# Altium schematic symbol library Connector.SchLib: 208 symbols (part 2 of 4)
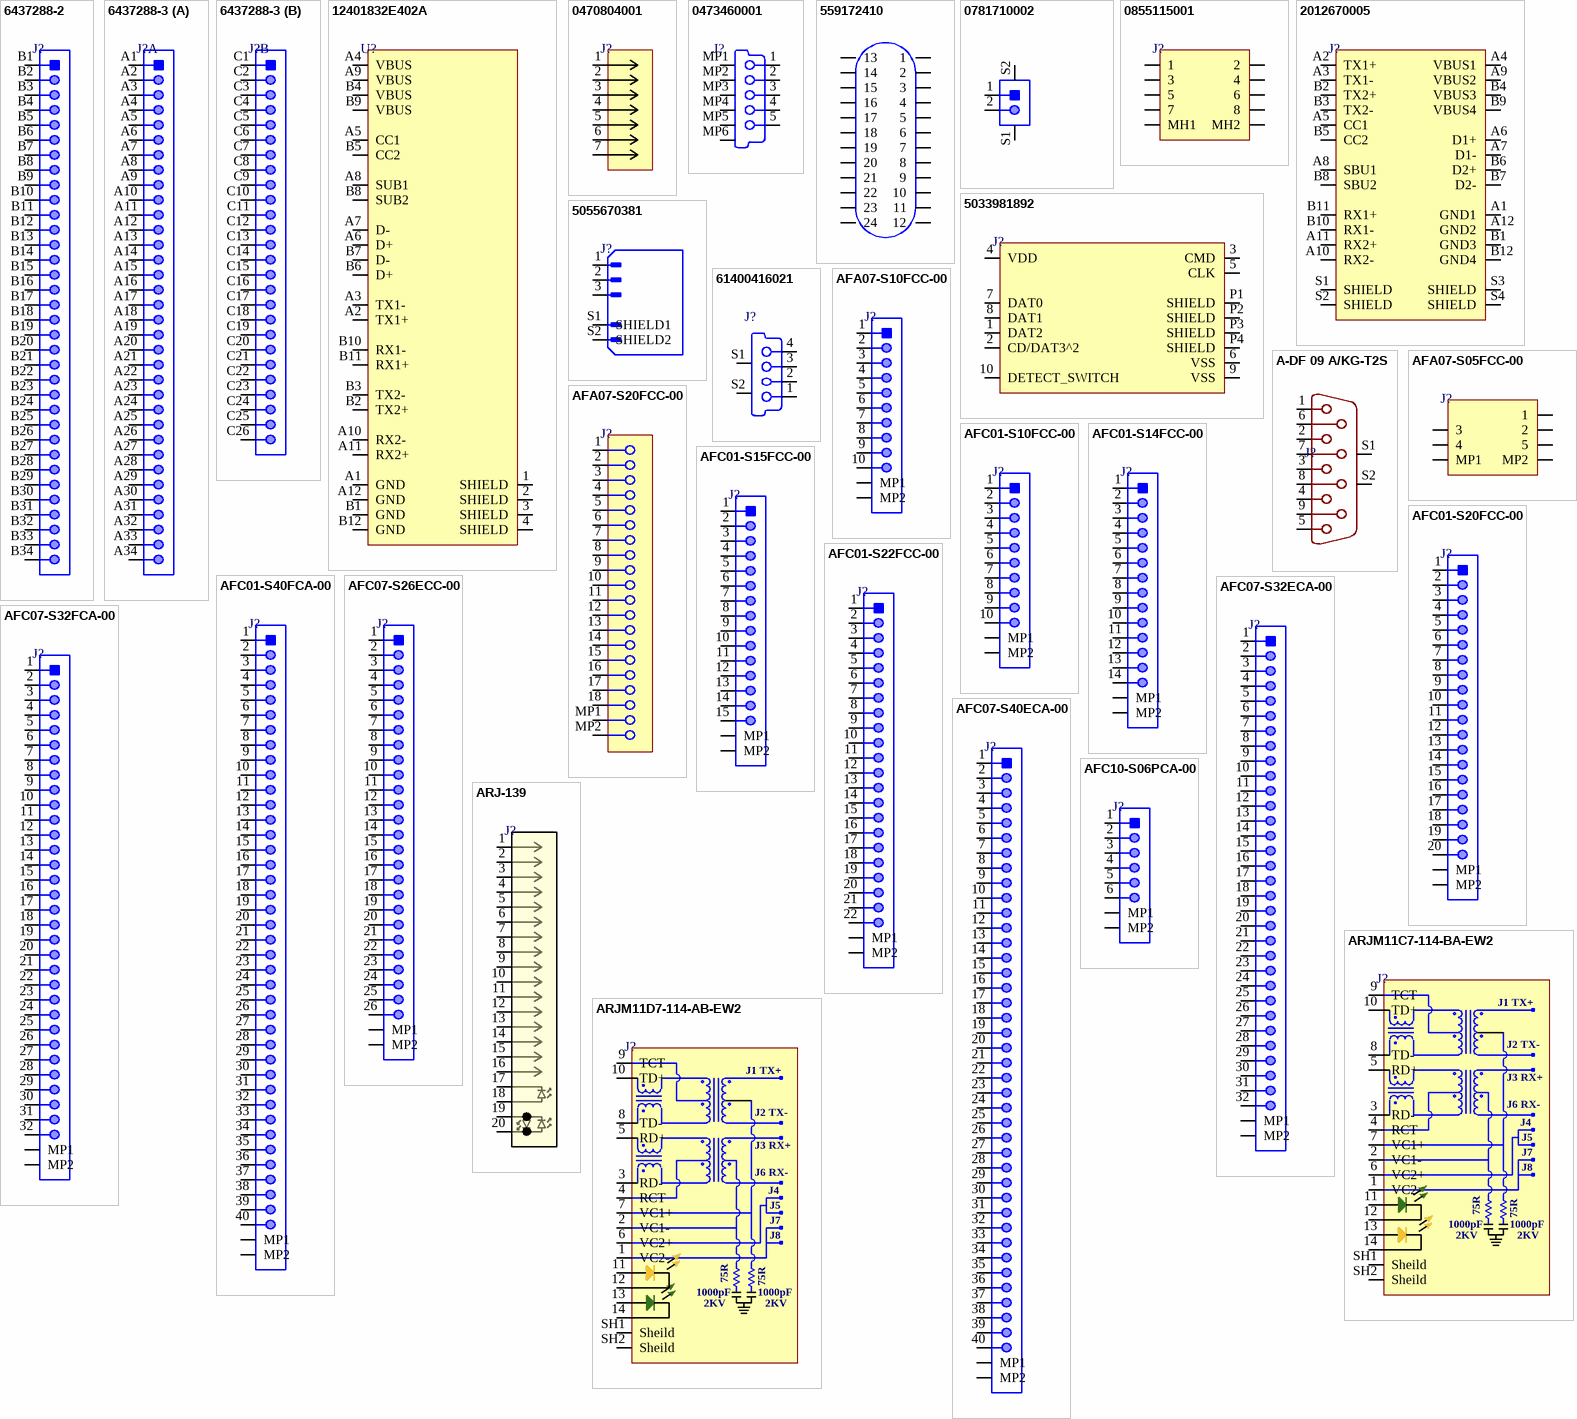
[diagram p9: symbols 6437288-2 to ARJM11D7-114-AB-EW2]

## 2012670005
designator J?
CONN RCP USB3.1 TYPEC 24P SMD RA; Manufacturer: Molex; Manufacturer Part Number: 2012670005; Item Type: USB C Connector; Supplier 1: RSComponents; RoHS: Yes; Category: Uncategorized; Stock 1: 1525; Pricing 1: 50=2.06600, 125=1.93000, 250=1.81600, 500=1.70800 (GBP); ComponentLink1URL: https://www.molex.com/pdm_docs/sd/2012670005_sd.pdf?src-supplier=Digi-Key; ComponentLink1Description: https://www.molex.com/pdm_docs/sd/2012670005_sd.pdf?src-supplier=Digi-Key; Supplier Part Number 1: 1768676P; ComponentLink2Description: LCSC; ComponentLink2URL: https://www.lcsc.com/product-detail/USB-Connectors_MOLEX-2012670005_C565324.html; LCSC Part Number: C565324
footprint 2012670005
pins: A1 GND1 (power), A2 TX1+, A3 TX1-, A4 VBUS1 (power), A5 CC1, A6 D1+, A7 D1-, A8 SBU1, A9 VBUS2 (power), A10 RX2-, A11 RX2+, A12 GND2 (power), B1 GND3 (power), B2 TX2+, B3 TX2-, B4 VBUS3 (power), B5 CC2, B6 D2+, B7 D2-, B8 SBU2, B9 VBUS4 (power), B10 RX1-, B11 RX1+, B12 GND4 (power), S1 SHIELD (power), S2 SHIELD (power), S3 SHIELD (power), S4 SHIELD (power)

## 5033981892
designator J?
MICRO SD PUSH/PUSH SMALL 8C; Manufacturer: Molex; Manufacturer Part Number: 503398-1892; Item Type: SD Card Connector; Supplier 1: Arrow Electronics; RoHS: Yes; Category: Memory Connectors; Stock 1: 14535; Pricing 1: 1=2.47900, 10=2.18900, 25=2.17400, 100=1.81200 (USD); ComponentLink1URL: https://datasheet.ciiva.com/29723/5033981892-sd-29723401.pdf?src-supplier=Digi-Key; ComponentLink1Description: https://datasheet.ciiva.com/29723/5033981892-sd-29723401.pdf?src-supplier=Digi-Key; ComponentLink2URL: https://datasheet.ciiva.com/22744/1740946-22744573.pdf?src-supplier=Element14; ComponentLink2Description: https://datasheet.ciiva.com/22744/1740946-22744573.pdf?src-supplier=Element14; ComponentLink3URL: https://datasheet.ciiva.com/23941/1740947-23941665.pdf?src-supplier=Newark; ComponentLink3Description: https://datasheet.ciiva.com/23941/1740947-23941665.pdf?src-supplier=Newark; Supplier Part Number 1: 503398-1892; LCSC Part Number: C428492
footprint 5033981892_
pins: 1 DAT2, 2 CD/DAT3^2, 3 CMD, 4 VDD, 5 CLK, 6 VSS, 7 DAT0, 8 DAT1, 9 VSS, 10 DETECT_SWITCH, P1 SHIELD, P2 SHIELD, P3 SHIELD, P4 SHIELD

## 5055670381
designator J?
CONN HEADER SMD R/A 3POS 1.25MM; Manufacturer: Molex; Manufacturer Part Number: 5055670381; Item Type: Headers and Wire Housings; Supplier: Mouser; Supplier Part Number: 538-505567-0381; RoHS: Yes; Stock: 6126; Pricing: 1=0.94, 10=0.784, 50=0.784, 100=0.653, 1000=0.65, 10000=0.501 (USD); ComponentLink1URL: http://www.literature.molex.com/SQLImages/kelmscott/Molex/PDF_Images/987651-4888.PDF?src-supplier=Digikey; ComponentLink1Description: http://www.literature.molex.com/SQLImages/kelmscott/Molex/PDF_Images/987651-4888.PDF?src-supplier=Digikey
footprint 5055670381
pins: 1, 2, 3, S1 SHIELD1, S2 SHIELD2

## 61400416021
designator J?
CONN RCPT USB2.0 TYPEA 4POS R/A; Manufacturer: Wurth Electronics; Manufacturer Part Number: 61400416021; Gender: Receptacle; Connector Type: USB; Number of Contacts: 4; Current Rating: 1A; Voltage Rating: 30V; Number of Ports: 1; Insulation Resistance: 1GR; Item Type: Connector; Supplier 1: Digi-Key; Stock 1: 7748; Pricing 1: 1=0.99, 10=0.874, 50=0.823, 100=0.739, 250=0.672 (USD); Mount: Through Hole,Horizontal; Contact Plating: Gold; Contact Material: Copper Alloy; Color: White; Min Operating Temperature: -40°C; Max Operating Temperature: 105°C; Packaging: Tray; Package Quantity: 60; Series: WR-COM; Number of Positions: 4; Termination: Solder; Orientation: Right Angle; USB Standard: USB 2.0; Length: 15.8mm; Width: 14.4mm; REACH SVHC: Unknown; Lead Free: Lead Free; Flammability Rating: UL94 V-0; ComponentLink1URL: https://www.distrelec.biz/Web/Downloads/he/et/4257096_eng_datasheet.pdf?mime=application%2Fpdf&src-supplier=Distrelec; ComponentLink1Description: https://www.distrelec.biz/Web/Downloads/he/et/4257096_eng_datasheet.pdf?mime=application%2Fpdf&src-supplier=Distrelec; ComponentLink2URL: http://www.farnell.com/datasheets/1712150.pdf?src-supplier=Element14; ComponentLink2Description: http://www.farnell.com/datasheets/1712150.pdf?src-supplier=Element14; ComponentLink3URL: http://www.farnell.com/datasheets/1712150.pdf?src-supplier=Newark; ComponentLink3Description: http://www.farnell.com/datasheets/1712150.pdf?src-supplier=Newark; ComponentLink4URL: http://katalog.we-online.de/kataloge/eican/media/pdf/61400416021.pdf?src-supplier=Mouser; ComponentLink4Description: http://katalog.we-online.de/kataloge/eican/media/pdf/61400416021.pdf?src-supplier=Mouser; ComponentLink5URL: https://katalog.we-online.de/em/datasheet/61400416021.pdf?src-supplier=Digi-Key; ComponentLink5Description: https://katalog.we-online.de/em/datasheet/61400416021.pdf?src-supplier=Digi-Key; ComponentLink6URL: http://documents.rs-components.com/techlib://itc_doclist_GB.htm?stockno=7480863&src-supplier=RSComponents; ComponentLink6Description: http://documents.rs-components.com/techlib://itc_doclist_GB.htm?stockno=7480863&src-supplier=RSComponents; ComponentLink7URL: http://www.produktinfo.conrad.com/datenblaetter/1000000-1099999/001088207-da-01-en-WR_COM_USB_TYP_A__61400416021.pdf?src-supplier=Conrad; ComponentLink7Description: http://www.produktinfo.conrad.com/datenblaetter/1000000-1099999/001088207-da-01-en-WR_COM_USB_TYP_A__61400416021.pdf?src-supplier=Conrad; Supplier Part Number 1: 732-2106-ND
footprint 61400416021_
pins: 1 V BUS (5V) "USB Vcc [Red]", 2 D- "USB Data - [White]", 3 D+ "USB Data + [Green]", 4 NC "Not Connected (or joined to pin 5 via resistor)", S1 Shield "Shell", S2 Shield "Shell"

## A-DF 09 A/KG-T2S
designator J?
CONN D-SUB RCPT 9POS R/A SLDR; Manufacturer: Assmann; Manufacturer Part Number: A-DF 09 A/KG-T2S; Item Type: D-Sub Connectors; Number of Contacts: 9NUMBER; Supplier: Digikey; Supplier Part Number: AE10921-ND; RoHS: Yes; Stock: 23990; Pricing: 1=0.78, 10=0.661, 25=0.6336, 40=0.62025, 90=0.59322, 270=0.53933, 450=0.4854, 990=0.43147, 2430=0.39102 (USD); Height: 12.68mm; Lead Free: 5697LeadFree; ComponentLink1URL: https://datasheet.ciiva.com/26927/getdatasheetpartid-755627-26927441.pdf?src-supplier=Verical; ComponentLink1Description: https://datasheet.ciiva.com/26927/getdatasheetpartid-755627-26927441.pdf?src-supplier=Verical
footprint A-DF 09 A/KG-T2S
pins: 1, 2, 3, 4, 5, 6, 7, 8, 9, S1, S2

## AFA07-S05FCC-00
designator J?
Slide Lock 5P Bottom Contact Surface Mount，Right Angle 1mm SMD,P=1mm,Surface Mount，Right Angle FFC/FPC Connectors ROHS; Manufacturer: JUSHUO; Manufacturer Part Number: AFA07-S05FCC-00; Package: SMD,P=1mm; LCSC Part Number: C262339; Item Type: FPC Connector; ComponentLink1Description: LCSC; ComponentLink1URL: https://www.lcsc.com/product-detail/FFC-FPC-Connectors_JUSHUO-AFA07-S05FCC-00_C262339.html
footprint AFA07-S05FCC-00
pins: 1, 2, 3, 4, 5, MP1, MP2

## AFA07-S10FCC-00
designator J?
Slide Lock 10P Bottom Contact Surface Mount 1mm SMD,P=1mm FFC/FPC Connectors ROHS; Manufacturer: JUSHUO; Manufacturer Part Number: AFA07-S10FCC-00; Package: SMD,P=1mm; LCSC Part Number: C52162; Item Type: FFC/FPC Connector; ComponentLink1Description: LCSC; ComponentLink1URL: https://www.lcsc.com/product-detail/FFC-FPC-Connectors_JUSHUO-AFA07-S10FCC-00_C52162.html
footprint AFA07-S10FCC-00
pins: 1, 2, 3, 4, 5, 6, 7, 8, 9, 10, MP1, MP2

## AFA07-S20FCC-00
designator J?
Slide Lock 20P Bottom Contact Surface Mount 1mm SMD,P=1mm,Surface Mount，Right Angle FFC/FPC Connectors ROHS; Manufacturer: JUSHUO; Manufacturer Part Number: AFA07-S20FCC-00; Package: SMD,P=1mm; LCSC Part Number: C262352; Item Type: FPC Connector; ComponentLink1Description: LCSC; ComponentLink1URL: https://www.lcsc.com/product-detail/FFC-FPC-Connectors_JUSHUO-AFA07-S20FCC-00_C262352.html
footprint AFA07-S20FCC-00
pins: 1, 2, 3, 4, 5, 6, 7, 8, 9, 10, 11, 12, 13, 14, 15, 16, 17, 18, MP1, MP2

## AFC01-S10FCC-00
designator J?
Clamshell 10 Bottom Contact Surface Mount 0.5mm SMD,P=0.5mm FFC/FPC Connectors ROHS; Manufacturer: JUSHUO; Manufacturer Part Number: AFC01-S10FCC-00; Package: SMD,P=0.5mm; LCSC Part Number: C262266; Item Type: FPC Connector; ComponentLink1Description: LCSC; ComponentLink1URL: https://www.lcsc.com/product-detail/FFC-FPC-Connectors_JUSHUO-AFC01-S10FCC-00_C262266.html
footprint AFC01-S10FCC-00
pins: 1, 2, 3, 4, 5, 6, 7, 8, 9, 10, MP1, MP2

## AFC01-S14FCC-00
designator J?
Clamshell 14P Bottom Contact Surface Mount 0.5mm SMD,P=0.5mm FFC/FPC Connectors ROHS; Manufacturer: JUSHUO; Manufacturer Part Number: AFC01-S14FCC-00; Package: SMD,P=0.5mm; LCSC Part Number: C577443; ComponentLink1Description: LCSC; ComponentLink1URL: https://www.lcsc.com/product-detail/FFC-FPC-Connectors_JUSHUO-AFC01-S14FCC-00_C577443.html; Item Type: FFC/FPC Connector
footprint AFC01-S14FCC-00
pins: 1, 2, 3, 4, 5, 6, 7, 8, 9, 10, 11, 12, 13, 14, MP1, MP2

## AFC01-S15FCC-00
designator J?
Clamshell 15 Bottom Contact Surface Mount 0.5mm SMD,P=0.5mm FFC/FPC Connectors ROHS; Manufacturer: JUSHUO; Manufacturer Part Number: AFC01-S15FCC-00; Package: SMD,P=0.5mm; LCSC Part Number: C262271; Item Type: FPC Connector; ComponentLink1Description: LCSC; ComponentLink1URL: https://www.lcsc.com/product-detail/FFC-FPC-Connectors_JUSHUO-AFC01-S15FCC-00_C262271.html
footprint AFC01-S15FCC-00
pins: 1, 2, 3, 4, 5, 6, 7, 8, 9, 10, 11, 12, 13, 14, 15, MP1, MP2

## AFC01-S20FCC-00
designator J?
Clamshell 20P Bottom Contact Surface Mount 0.5mm SMD,P=0.5mm FFC/FPC Connectors ROHS; Manufacturer: JUSHUO; Manufacturer Part Number: AFC01-S20FCC-00; Package: SMD,P=0.5mm; LCSC Part Number: C262274; ComponentLink1Description: LCSC; ComponentLink1URL: https://www.lcsc.com/product-detail/FFC-FPC-Connectors_JUSHUO-AFC01-S20FCC-00_C262274.html; Item Type: FPC Connector
footprint AFC01-S20FCC-00
pins: 1, 2, 3, 4, 5, 6, 7, 8, 9, 10, 11, 12, 13, 14, 15, 16, 17, 18, 19, 20, MP1, MP2

## AFC01-S22FCC-00
designator J?
Clamshell 22P Bottom Contact Surface Mount 0.5mm SMD,P=0.5mm FFC/FPC Connectors ROHS; Manufacturer: JUSHUO; Manufacturer Part Number: AFC01-S22FCC-00; Package: SMD,P=0.5mm; LCSC Part Number: C262275; Item Type: FPC Connector; ComponentLink1Description: LCSC; ComponentLink1URL: https://www.lcsc.com/product-detail/FFC-FPC-Connectors_JUSHUO-AFC01-S22FCC-00_C262275.html
footprint AFC01-S22FCC-00
pins: 1, 2, 3, 4, 5, 6, 7, 8, 9, 10, 11, 12, 13, 14, 15, 16, 17, 18, 19, 20, 21, 22, MP1, MP2

## AFC01-S40FCA-00
designator J?
SMD,P=0.5mm,Surface Mount，Right Angle; Manufacturer: Jushuo; Manufacturer Part Number: AFC01-S40FCA-00; Item Type: FFC/FPC Connector; Supplier: LCSC; LCSC Part Number: C262674; RoHS: No
footprint AFC01-S40FCA-00
pins: 1, 2, 3, 4, 5, 6, 7, 8, 9, 10, 11, 12, 13, 14, 15, 16, 17, 18, 19, 20, 21, 22, 23, 24, 25, 26, 27, 28, 29, 30, 31, 32, 33, 34, 35, 36, 37, 38, 39, 40, MP1, MP2

## AFC07-S26ECC-00
designator J?
CONN FPC Slide Lock 26 Contact,Top Surface Mount 0.5mm; Manufacturer: JUSHUO; Manufacturer Part Number: AFC07-S26ECC-00; Number of Contacts: 26; FFC, FCB Thickness: 0.3mm~0.3mm; Item Type: FPC Connector; Height Above Board: 2mm; Contact Type: Contact,Top; Mounting Type: Surface Mount; Pitch: 0.5mm; LCSC Part Number: C11094; ComponentLink1Description: LCSC; ComponentLink1URL: https://lcsc.com/product-detail/FFC-FPC-Connectors_JUSHUO-AFC07-S26ECC-00_C11094.html
footprint AFC07-S26ECC-00_ (Slide Lock 26 Contact,Top Surface Mount 0.5mm SMD,P=0.5mm FFC/FPC Connectors ROHS)
pins: 1, 2, 3, 4, 5, 6, 7, 8, 9, 10, 11, 12, 13, 14, 15, 16, 17, 18, 19, 20, 21, 22, 23, 24, 25, 26, MP1, MP2

## AFC07-S32ECA-00
designator J?
Slide Lock 32P Contact,Top Surface Mount，Right Angle 0.5mm SMD,P=0.5mm,Surface Mount，Right Angle FFC/FPC Connectors ROHS; Manufacturer: JUSHUO; Manufacturer Part Number: AFC07-S32ECA-00; Package: Custom; LCSC Part Number: C262646; Item Type: FFC/FPC Connector; ComponentLink1Description: LCSC; ComponentLink1URL: https://www.lcsc.com/product-detail/FFC-FPC-Connectors_JUSHUO-AFC07-S32ECA-00_C262646.html
footprint AFC07-S32ECA-00
pins: 1, 2, 3, 4, 5, 6, 7, 8, 9, 10, 11, 12, 13, 14, 15, 16, 17, 18, 19, 20, 21, 22, 23, 24, 25, 26, 27, 28, 29, 30, 31, 32, MP1, MP2

## AFC07-S32FCA-00
designator J?
Slide Lock 32 Bottom Contact Surface Mount 0.5mm SMD,P=0.5mm FFC/FPC Connectors ROHS; Manufacturer: JUSHUO; Manufacturer Part Number: AFC07-S32FCA-00; Footprint: Custom; ComponentLink1Description: LCSC; ComponentLink1URL: https://lcsc.com/product-detail/FFC-FPC-Connectors_JUSHUO-AFC07-S32FCA-00_C262570.html; LCSC Part Number: C262570; Item type: FPC Connector
footprint AFC07-S32FCA-00_
pins: 1, 2, 3, 4, 5, 6, 7, 8, 9, 10, 11, 12, 13, 14, 15, 16, 17, 18, 19, 20, 21, 22, 23, 24, 25, 26, 27, 28, 29, 30, 31, 32, MP1, MP2

## AFC07-S40ECA-00
designator J?
SMD,P=0.5mm,Surface Mount，Right Angle; Manufacturer: Jushuo; Manufacturer Part Number: AFC07-S40ECA-00; Item Type: FFC/FPC Connector; Supplier: LCSC; LCSC Part Number: C262648; RoHS: No
footprint AFC07-S40ECA-00
pins: 1, 2, 3, 4, 5, 6, 7, 8, 9, 10, 11, 12, 13, 14, 15, 16, 17, 18, 19, 20, 21, 22, 23, 24, 25, 26, 27, 28, 29, 30, 31, 32, 33, 34, 35, 36, 37, 38, 39, 40, MP1, MP2

## AFC10-S06PCA-00
designator J?
1x6P 1 1mm Male pin 6 -25℃~+85℃ 500mA Brick nogging SMD,P=1mm Wire To Board / Wire To Wire Connector ROHS; Manufacturer: JUSHUO; Manufacturer Part Number: AFC10-S06PCA-00; Package: SMD,P=1mm; ComponentLink1Description: LCSC; ComponentLink1URL: https://www.lcsc.com/product-detail/Wire-To-Board-Wire-To-Wire-Connector_JUSHUO-AFC10-S06PCA-00_C2764200.html; LCSC Part Number: C2764200; Item Type: Connector
footprint AFC10-S06PCA-00
pins: 1, 2, 3, 4, 5, 6, MP1, MP2

## ARJ-139
designator J?
CONN JACK 1PORT 1000 BASE-T PCB; Manufacturer: Abracon; Manufacturer Part Number: ARJ-139; Item Type: Ethernet Connector; Supplier: Digikey; Supplier Part Number: 535-13142-ND; RoHS: Yes; Stock: 4154; Pricing: 1=8.75, 10=7.875, 25=7.4184, 40=7.22825, 80=7.03813, 240=6.27721, 440=5.8968, 960=5.212 (USD); ComponentLink1URL: http://www.abracon.com/Magnetics/lan/ARJ-139.pdf?src-supplier=Digikey; ComponentLink1Description: http://www.abracon.com/Magnetics/lan/ARJ-139.pdf?src-supplier=Digikey; ComponentLink2URL: https://datasheet.octopart.com/ARJ-139-Abracon-datasheet-62096546.pdf?src-supplier=Sager+Electronics; ComponentLink2Description: https://datasheet.octopart.com/ARJ-139-Abracon-datasheet-62096546.pdf?src-supplier=Sager+Electronics
footprint ARJ-139
pins: 1 CT, 2 TRD2-, 3 TRD2+, 4 TRD1+, 5 TRD1-, 6 CT, 7 CT, 8 TRD3+, 9 TRD3-, 10 TRD0-, 11 TRD0+, 12 CT, 13 P13, 14 P14, 15 P15, 16 P16, 17 CATHODE_Y, 18 ANODE_Y, 19 ANODE_O/CATHODE_G, 20 ANODE_G/CATHODE_O

## ARJM11C7-114-BA-EW2
designator J?
Conn RJ-45 F 8 POS 1.27mm Solder RA Thru-Hole 14 Terminal 1 Port Tray; Manufacturer: Abracon; Manufacturer Part Number: ARJM11C7-114-BA-EW2; Connector Type: RJ45; Direction: Up; Number of Ports: 1; Number of Cores per Jack: 4; Shielding: Shielded; Item Type: Ethernet Connector; Supplier 1: Digi-Key; RoHS: Yes; Category: Modular / Ethernet Connectors; Stock 1: 9404; Pricing 1: 1=3.46, 10=3.139, 25=2.9728, 40=2.90375, 100=2.7654, 300=2.4197, 500=2.35058, 1000=2.0049, 2400=1.86663 (USD); Mounting Technology: Through Hole; Color: Green,Yellow; Contact Plating: Gold; Min Operating Temperature: -40°C; Max Operating Temperature: 85°C; Packaging: Tray; Number of Rows: 1; Termination: Solder; Series: ARJM11; RoHS Compliant: Yes; Supplier Part Number 1: 535-14168-ND
footprint ARJM11C7-114-BA-EW2
pins: 1 VC2-, 2 VC1-, 3 RD-, 4 RCT, 5 RD+, 6 VC2+, 7 VC1+, 8 TD-, 9 TCT, 10 TD+, 11 ANODE , 12 CATHODE, 13 ANODE , 14 CATHODE, SH1 Sheild, SH2 Sheild
text: J1 TX+; J2 TX-; J3 RX+; J6 RX-; J4; J5; J7; J8; 75R; 1000pF; 2KV

## ARJM11D7-114-AB-EW2
designator J?
CONN JACK 1PORT 100 BASE-T PCB; Manufacturer: Abracon; Manufacturer Part Number: ARJM11D7-114-AB-EW2; Connector Type: RJ45; Direction: Up; Number of Ports: 1; Number of Cores per Jack: 4; Shielding: Shielded; Item Type: Ethernet Connector; Supplier 1: Mouser; RoHS: Yes; Category: Modular / Ethernet Connectors; Stock 1: 4503; Pricing 1: 1=3.42, 10=3.29, 50=2.88, 100=2.73, 1000=1.98, 10000=1.77 (USD); Mounting Technology: Through Hole; Color: Green,Yellow; Contact Plating: Gold; Min Operating Temperature: -40°C; Max Operating Temperature: 85°C; Packaging: Tray; Number of Rows: 1; Termination: Solder; Series: ARJM11; RoHS Compliant: Yes; ComponentLink1URL: https://abracon.com/Magnetics/ARJM11.pdf?src-supplier=Digi-Key; ComponentLink1Description: https://abracon.com/Magnetics/ARJM11.pdf?src-supplier=Digi-Key; Supplier Part Number 1: 815-RJM11D7114ABEW2
footprint ARJM11D7-114-AB-EW2
pins: 1 VC2-, 2 VC1-, 3 RD-, 4 RCT, 5 RD+, 6 VC2+, 7 VC1+, 8 TD-, 9 TCT, 10 TD+, 11 ANODE , 12 CATHODE, 13 ANODE , 14 CATHODE, SH1 Sheild, SH2 Sheild
text: J1 TX+; J2 TX-; J3 RX+; J6 RX-; J4; J5; J7; J8; 75R; 1000pF; 2KV

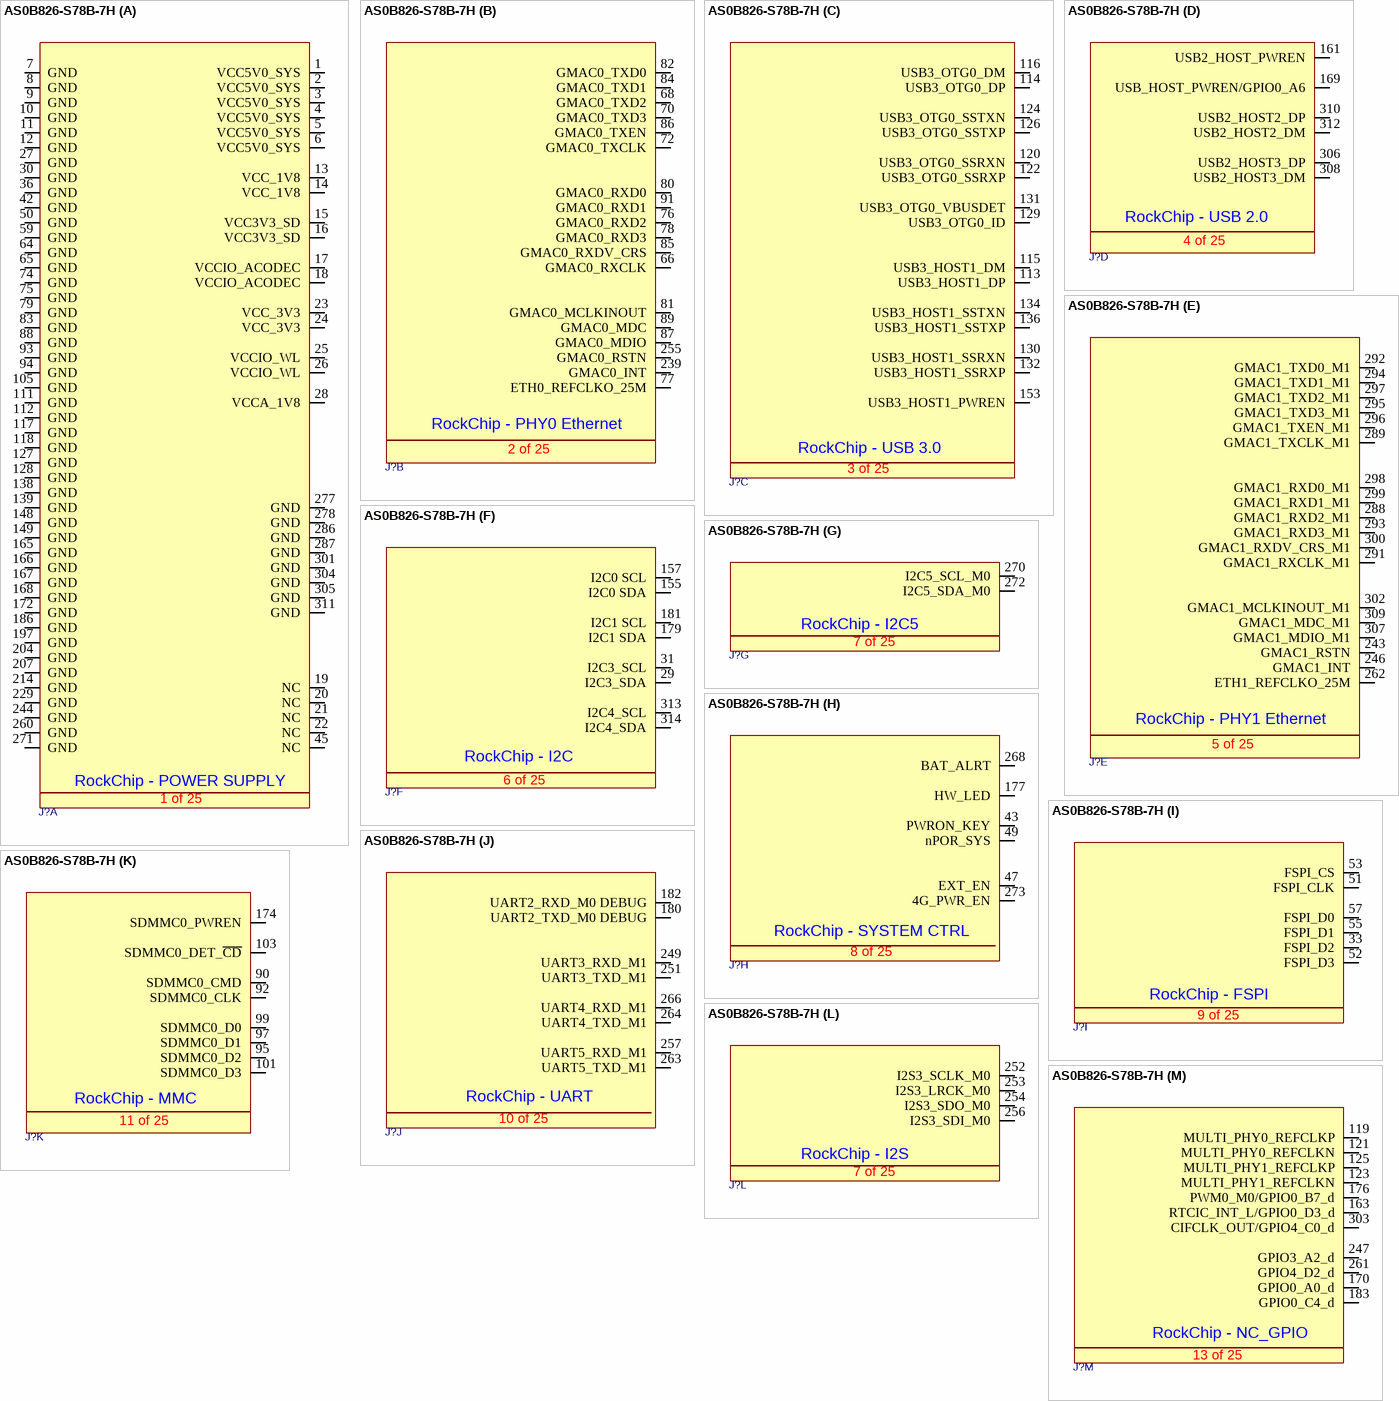
[diagram p2: symbol AS0B826-S78B-7H]

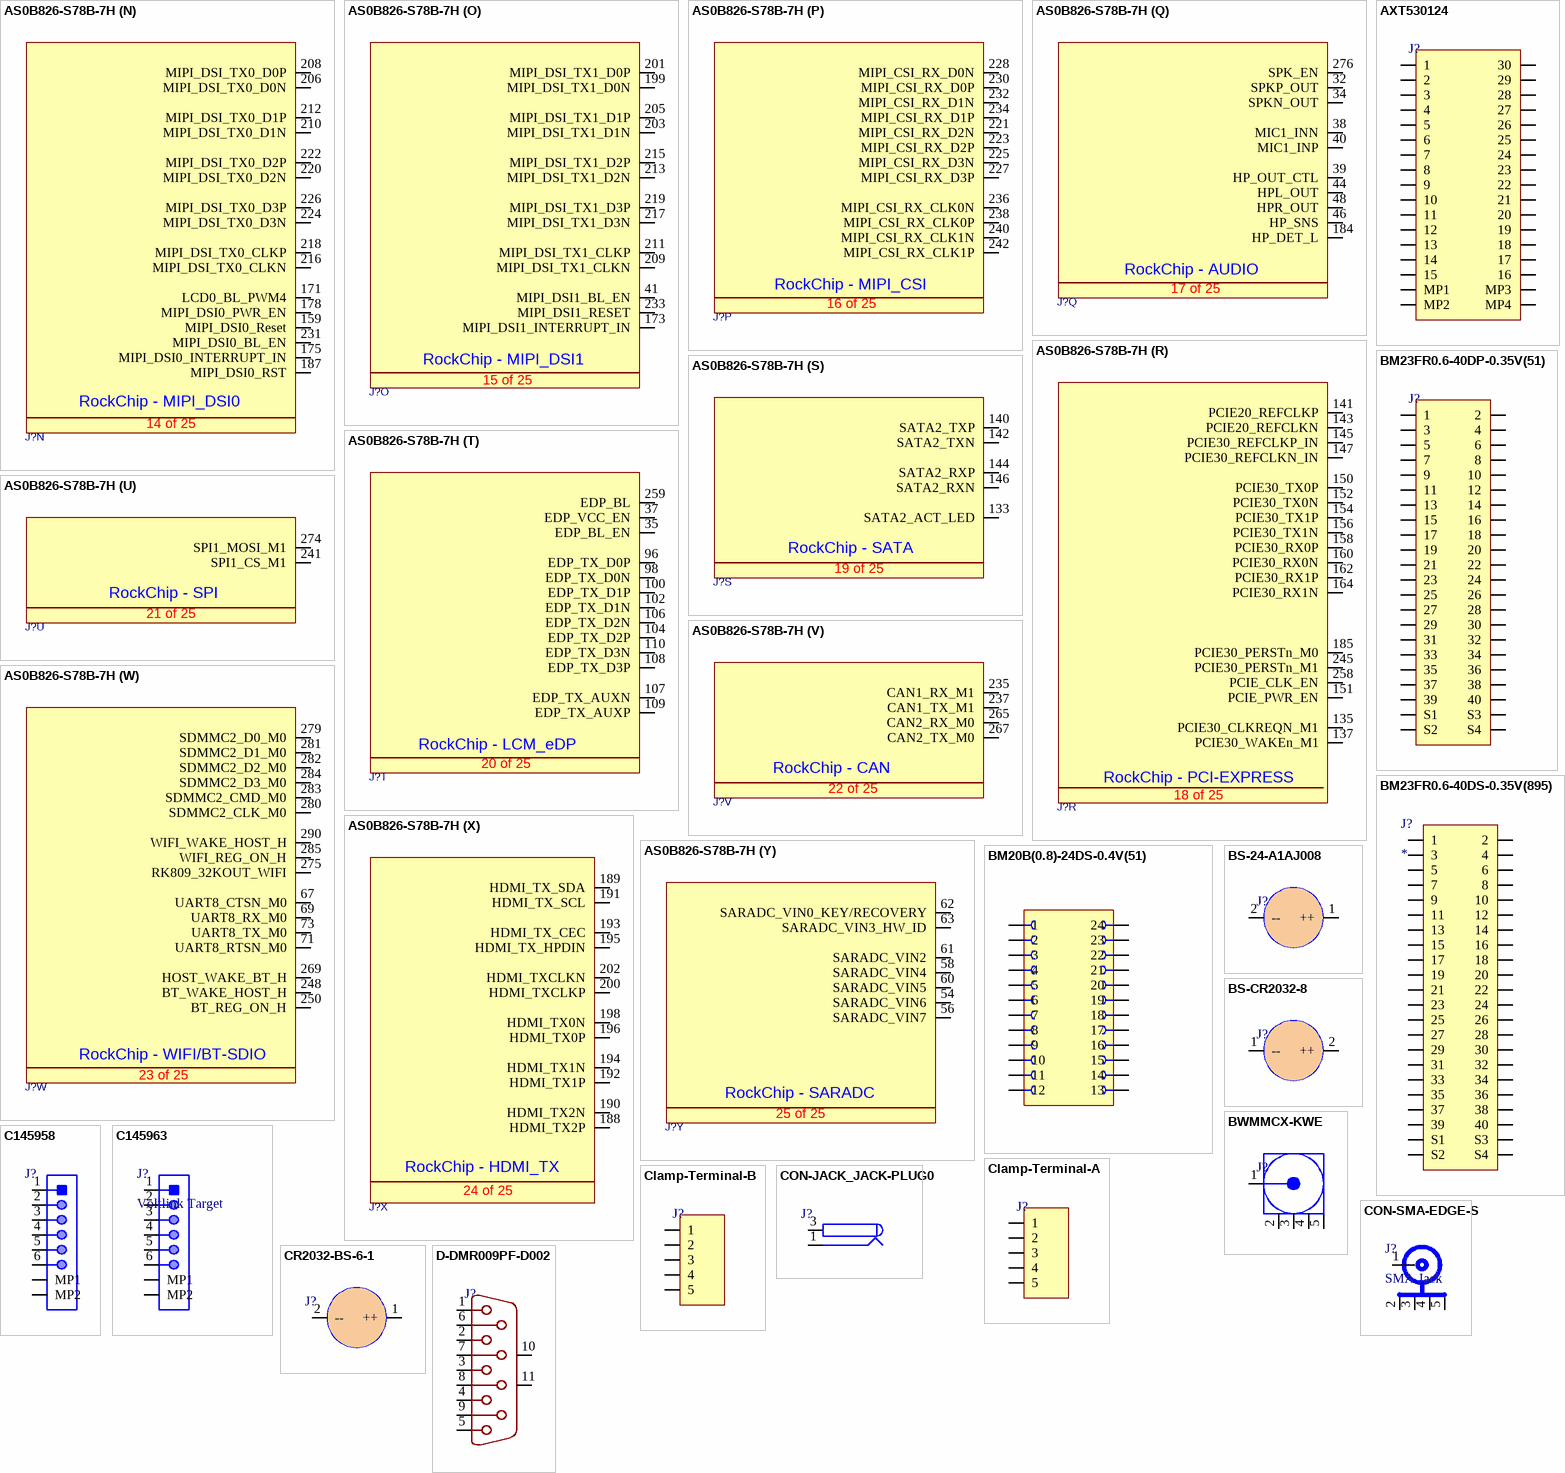
[diagram p3: symbols AS0B826-S78B-7H to D-DMR009PF-D002]

## AS0B826-S78B-7H
designator J?
SMD,P=0.5mm,Surface Mount，Right Angle; Manufacturer: FOXCONN; Manufacturer Part Number: AS0B826-S78B-7H; Item Type: Card Edge Connectors; Supplier: LCSC; LCSC Part Number: C426232; RoHS: No; Stock: 4979; Pricing: 1=9.21, 10=8.287, 25=7.8064, 50=7.6064, 100=7.4062 (USD)
footprint AS0B826-S78B-7H
part A pins: 1 VCC5V0_SYS, 2 VCC5V0_SYS, 3 VCC5V0_SYS, 4 VCC5V0_SYS, 5 VCC5V0_SYS, 6 VCC5V0_SYS, 7 GND, 8 GND, 9 GND, 10 GND, 11 GND (power), 12 GND (power), 13 VCC_1V8, 14 VCC_1V8, 15 VCC3V3_SD, 16 VCC3V3_SD, 17 VCCIO_ACODEC, 18 VCCIO_ACODEC, 19 NC, 20 NC, 21 NC, 22 NC, 23 VCC_3V3, 24 VCC_3V3, 25 VCCIO_WL, 26 VCCIO_WL, 27 GND (power), 28 VCCA_1V8, 30 GND (power), 36 GND (power), 42 GND (power), 45 NC, 50 GND (power), 59 GND (power), 64 GND (power), 65 GND (power), 74 GND (power), 75 GND (power), 79 GND (power), 83 GND (power), 88 GND (power), 93 GND (power), 94 GND (power), 105 GND (power), 111 GND (power), 112 GND (power), 117 GND (power), 118 GND (power), 127 GND (power), 128 GND (power), 138 GND (power), 139 GND (power), 148 GND (power), 149 GND (power), 165 GND (power), 166 GND (power), 167 GND (power), 168 GND (power), 172 GND (power), 186 GND (power), 197 GND (power), 204 GND (power), 207 GND (power), 214 GND (power), 229 GND (power), 244 GND (power), 260 GND (power), 271 GND (power), 277 GND (power), 278 GND (power), 286 GND (power), 287 GND (power), 301 GND (power), 304 GND (power), 305 GND, 311 GND (power)
part B pins: 66 GMAC0_RXCLK, 68 GMAC0_TXD2, 70 GMAC0_TXD3, 72 GMAC0_TXCLK, 76 GMAC0_RXD2, 77 ETH0_REFCLKO_25M, 78 GMAC0_RXD3, 80 GMAC0_RXD0, 81 GMAC0_MCLKINOUT, 82 GMAC0_TXD0, 84 GMAC0_TXD1, 85 GMAC0_RXDV_CRS, 86 GMAC0_TXEN, 87 GMAC0_MDIO, 89 GMAC0_MDC, 91 GMAC0_RXD1, 239 GMAC0_INT, 255 GMAC0_RSTN
part C pins: 113 USB3_HOST1_DP, 114 USB3_OTG0_DP, 115 USB3_HOST1_DM, 116 USB3_OTG0_DM, 120 USB3_OTG0_SSRXN, 122 USB3_OTG0_SSRXP, 124 USB3_OTG0_SSTXN, 126 USB3_OTG0_SSTXP, 129 USB3_OTG0_ID, 130 USB3_HOST1_SSRXN, 131 USB3_OTG0_VBUSDET, 132 USB3_HOST1_SSRXP, 134 USB3_HOST1_SSTXN, 136 USB3_HOST1_SSTXP, 153 USB3_HOST1_PWREN
part D pins: 161 USB2_HOST_PWREN, 169 USB_HOST_PWREN/GPIO0_A6, 306 USB2_HOST3_DP, 308 USB2_HOST3_DM, 310 USB2_HOST2_DP, 312 USB2_HOST2_DM
part E pins: 243 GMAC1_RSTN, 246 GMAC1_INT, 262 ETH1_REFCLKO_25M, 288 GMAC1_RXD2_M1, 289 GMAC1_TXCLK_M1, 291 GMAC1_RXCLK_M1, 292 GMAC1_TXD0_M1, 293 GMAC1_RXD3_M1, 294 GMAC1_TXD1_M1, 295 GMAC1_TXD3_M1, 296 GMAC1_TXEN_M1, 297 GMAC1_TXD2_M1, 298 GMAC1_RXD0_M1, 299 GMAC1_RXD1_M1, 300 GMAC1_RXDV_CRS_M1, 302 GMAC1_MCLKINOUT_M1, 307 GMAC1_MDIO_M1, 309 GMAC1_MDC_M1
part F pins: 29 I2C3_SDA, 31 I2C3_SCL, 155 I2C0 SDA, 157 I2C0 SCL, 179 I2C1 SDA, 181 I2C1 SCL, 313 I2C4_SCL, 314 I2C4_SDA
part G pins: 270 I2C5_SCL_M0, 272 I2C5_SDA_M0
part H pins: 43 PWRON_KEY, 47 EXT_EN, 49 nPOR_SYS, 177 HW_LED, 268 BAT_ALRT, 273 4G_PWR_EN
part I pins: 33 FSPI_D2, 51 FSPI_CLK, 52 FSPI_D3, 53 FSPI_CS, 55 FSPI_D1, 57 FSPI_D0
part J pins: 180 UART2_TXD_M0 DEBUG, 182 UART2_RXD_M0 DEBUG, 249 UART3_RXD_M1, 251 UART3_TXD_M1, 257 UART5_RXD_M1, 263 UART5_TXD_M1, 264 UART4_TXD_M1, 266 UART4_RXD_M1
part K pins: 90 SDMMC0_CMD, 92 SDMMC0_CLK, 95 SDMMC0_D2, 97 SDMMC0_D1, 99 SDMMC0_D0, 101 SDMMC0_D3, 103 SDMMC0_DET_~{CD}, 174 SDMMC0_PWREN
part L pins: 252 I2S3_SCLK_M0, 253 I2S3_LRCK_M0, 254 I2S3_SDO_M0, 256 I2S3_SDI_M0
part M pins: 119 MULTI_PHY0_REFCLKP, 121 MULTI_PHY0_REFCLKN, 123 MULTI_PHY1_REFCLKN, 125 MULTI_PHY1_REFCLKP, 163 RTCIC_INT_L/GPIO0_D3_d, 170 GPIO0_A0_d, 176 PWM0_M0/GPIO0_B7_d, 183 GPIO0_C4_d, 247 GPIO3_A2_d, 261 GPIO4_D2_d, 303 CIFCLK_OUT/GPIO4_C0_d
part N pins: 159 MIPI_DSI0_Reset, 171 LCD0_BL_PWM4, 175 MIPI_DSI0_INTERRUPT_IN, 178 MIPI_DSI0_PWR_EN, 187 MIPI_DSI0_RST, 206 MIPI_DSI_TX0_D0N, 208 MIPI_DSI_TX0_D0P, 210 MIPI_DSI_TX0_D1N, 212 MIPI_DSI_TX0_D1P, 216 MIPI_DSI_TX0_CLKN, 218 MIPI_DSI_TX0_CLKP, 220 MIPI_DSI_TX0_D2N, 222 MIPI_DSI_TX0_D2P, 224 MIPI_DSI_TX0_D3N, 226 MIPI_DSI_TX0_D3P, 231 MIPI_DSI0_BL_EN
part O pins: 41 MIPI_DSI1_BL_EN, 173 MIPI_DSI1_INTERRUPT_IN, 199 MIPI_DSI_TX1_D0N, 201 MIPI_DSI_TX1_D0P, 203 MIPI_DSI_TX1_D1N, 205 MIPI_DSI_TX1_D1P, 209 MIPI_DSI_TX1_CLKN, 211 MIPI_DSI_TX1_CLKP, 213 MIPI_DSI_TX1_D2N, 215 MIPI_DSI_TX1_D2P, 217 MIPI_DSI_TX1_D3N, 219 MIPI_DSI_TX1_D3P, 233 MIPI_DSI1_RESET
part P pins: 221 MIPI_CSI_RX_D2N, 223 MIPI_CSI_RX_D2P, 225 MIPI_CSI_RX_D3N, 227 MIPI_CSI_RX_D3P, 228 MIPI_CSI_RX_D0N, 230 MIPI_CSI_RX_D0P, 232 MIPI_CSI_RX_D1N, 234 MIPI_CSI_RX_D1P, 236 MIPI_CSI_RX_CLK0N, 238 MIPI_CSI_RX_CLK0P, 240 MIPI_CSI_RX_CLK1N, 242 MIPI_CSI_RX_CLK1P
part Q pins: 32 SPKP_OUT, 34 SPKN_OUT, 38 MIC1_INN, 39 HP_OUT_CTL, 40 MIC1_INP, 44 HPL_OUT, 46 HP_SNS, 48 HPR_OUT, 184 HP_DET_L, 276 SPK_EN
part R pins: 135 PCIE30_CLKREQN_M1, 137 PCIE30_WAKEn_M1, 141 PCIE20_REFCLKP, 143 PCIE20_REFCLKN, 145 PCIE30_REFCLKP_IN, 147 PCIE30_REFCLKN_IN, 150 PCIE30_TX0P, 151 PCIE_PWR_EN, 152 PCIE30_TX0N, 154 PCIE30_TX1P, 156 PCIE30_TX1N, 158 PCIE30_RX0P, 160 PCIE30_RX0N, 162 PCIE30_RX1P, 164 PCIE30_RX1N, 185 PCIE30_PERSTn_M0, 245 PCIE30_PERSTn_M1, 258 PCIE_CLK_EN
part S pins: 133 SATA2_ACT_LED, 140 SATA2_TXP, 142 SATA2_TXN, 144 SATA2_RXP, 146 SATA2_RXN
part T pins: 35 EDP_BL_EN, 37 EDP_VCC_EN, 96 EDP_TX_D0P, 98 EDP_TX_D0N, 100 EDP_TX_D1P, 102 EDP_TX_D1N, 104 EDP_TX_D2P, 106 EDP_TX_D2N, 107 EDP_TX_AUXN, 108 EDP_TX_D3P, 109 EDP_TX_AUXP, 110 EDP_TX_D3N, 259 EDP_BL
part U pins: 241 SPI1_CS_M1, 274 SPI1_MOSI_M1
part V pins: 235 CAN1_RX_M1, 237 CAN1_TX_M1, 265 CAN2_RX_M0, 267 CAN2_TX_M0
part W pins: 67 UART8_CTSN_M0, 69 UART8_RX_M0, 71 UART8_RTSN_M0, 73 UART8_TX_M0, 248 BT_WAKE_HOST_H, 250 BT_REG_ON_H, 269 HOST_WAKE_BT_H, 275 RK809_32KOUT_WIFI, 279 SDMMC2_D0_M0, 280 SDMMC2_CLK_M0, 281 SDMMC2_D1_M0, 282 SDMMC2_D2_M0, 283 SDMMC2_CMD_M0, 284 SDMMC2_D3_M0, 285 WIFI_REG_ON_H, 290 WIFI_WAKE_HOST_H
part X pins: 188 HDMI_TX2P, 189 HDMI_TX_SDA, 190 HDMI_TX2N, 191 HDMI_TX_SCL, 192 HDMI_TX1P, 193 HDMI_TX_CEC, 194 HDMI_TX1N, 195 HDMI_TX_HPDIN, 196 HDMI_TX0P, 198 HDMI_TX0N, 200 HDMI_TXCLKP, 202 HDMI_TXCLKN
part Y pins: 54 SARADC_VIN6, 56 SARADC_VIN7, 58 SARADC_VIN4, 60 SARADC_VIN5, 61 SARADC_VIN2, 62 SARADC_VIN0_KEY/RECOVERY, 63 SARADC_VIN3_HW_ID
part A text: RockChip - POWER SUPPLY; 1 of 25
part B text: RockChip - PHY0 Ethernet; 2 of 25
part C text: RockChip - USB 3.0; 3 of 25
part D text: RockChip - USB 2.0; 4 of 25
part E text: RockChip - PHY1 Ethernet; 5 of 25
part F text: RockChip - I2C; 6 of 25
part G text: RockChip - I2C5; 7 of 25
part H text: RockChip - SYSTEM CTRL; 8 of 25
part I text: RockChip - FSPI; 9 of 25
part J text: RockChip - UART; 10 of 25
part K text: RockChip - MMC; 11 of 25
part L text: RockChip - I2S; 7 of 25
part M text: RockChip - NC_GPIO; 13 of 25
part N text: RockChip - MIPI_DSI0; 14 of 25
part O text: RockChip - MIPI_DSI1; 15 of 25
part P text: RockChip - MIPI_CSI; 16 of 25
part Q text: RockChip - AUDIO; 17 of 25
part R text: RockChip - PCI-EXPRESS; 18 of 25
part S text: RockChip - SATA; 19 of 25
part T text: RockChip - LCM_eDP; 20 of 25
part U text: RockChip - SPI; 21 of 25
part V text: RockChip - CAN; 22 of 25
part W text: RockChip - WIFI/BT-SDIO; 23 of 25
part X text: RockChip - HDMI_TX; 24 of 25
part Y text: RockChip - SARADC; 25 of 25

## AXT530124
designator J?
CONN SOCKET 30POS SMD GOLD; Manufacturer: Panasonic; Manufacturer Part Number: AXT530124; Number of Positions: 30; Contact Resistance: 90mR; Max Current Rating: 5A; Max Voltage Rating (DC): 60V; Current Rating: 300mA; Insulation Resistance: 1GR; Pitch: 0.4mm; Mated Stacking Heights: 1mm; Item Type: Connector; Supplier 1: Digi-Key; RoHS: Yes; Category: Board to Board Connectors; Stock 1: 14790; Pricing 1: 1=1.43000, 10=1.20900, 25=1.15960, 50=1.13500, 100=1.08570, 250=0.98700, 500=0.88830, 1000=0.78960 (USD); Mount: Surface Mount; Contact Plating: Gold; Contact Material: Copper Alloy; Housing Material: Polymer; Min Operating Temperature: -55°C; Max Operating Temperature: 85°C; Package Quantity: 1; Number of Rows: 2; Packaging: Tape and Reel; Connector Type: Socket; Voltage Rating: 60V; Termination: Solder; Number of Contacts: 30; Max Voltage Rating (AC): 60V; Orientation: Straight; Series: F4S; Length: 8.5mm; Depth: 3mm; Radiation Hardening: No; Lead Free: Lead Free; RoHS Compliant: Yes; ComponentLink1URL: http://components.arrow.com/part/dataview/0323_03238060?src-supplier=Arrow+Europe; ComponentLink1Description: http://components.arrow.com/part/dataview/0323_03238060?src-supplier=Arrow+Europe; ComponentLink2URL: http://www.mouser.com/ds/2/315/f4s-catalog-1075850.pdf?src-supplier=Mouser; ComponentLink2Description: http://www.mouser.com/ds/2/315/f4s-catalog-1075850.pdf?src-supplier=Mouser; ComponentLink3URL: http://components.arrow.com/part/dataview/46992153S8061598N2972?src-supplier=Arrow+Electronics; ComponentLink3Description: http://components.arrow.com/part/dataview/46992153S8061598N2972?src-supplier=Arrow+Electronics; ComponentLink4URL: http://panasonic-denko.co.jp/ac/e_download/control/connector/base-fpc/catalog/con_eng_f4s.pdf?via=ok&src-supplier=Avnet; ComponentLink4Description: http://panasonic-denko.co.jp/ac/e_download/control/connector/base-fpc/catalog/con_eng_f4s.pdf?via=ok&src-supplier=Avnet; ComponentLink5URL: http://www3.panasonic.biz/ac/e_download/control/connector/base-fpc/catalog/con_eng_f4s.pdf?src-supplier=Digi-Key; ComponentLink5Description: http://www3.panasonic.biz/ac/e_download/control/connector/base-fpc/catalog/con_eng_f4s.pdf?src-supplier=Digi-Key; ComponentLink6URL: http://panasonic-denko.co.jp/ac/e_download/control/connector/base-fpc/catalog/con_eng_f4s.pdf?via=ok&src-supplier=Avnet+Asia; ComponentLink6Description: http://panasonic-denko.co.jp/ac/e_download/control/connector/base-fpc/catalog/con_eng_f4s.pdf?via=ok&src-supplier=Avnet+Asia; ComponentLink7URL: https://www.verical.com/server-webapp/html/getDatasheet?partID=80226&src-supplier=Verical; ComponentLink7Description: https://www.verical.com/server-webapp/html/getDatasheet?partID=80226&src-supplier=Verical; ComponentLink8URL: http://www.onlinecomponents.com/datasheet/axt530124.aspx?p=10552986&src-supplier=Onlinecomponents.com; ComponentLink8Description: http://www.onlinecomponents.com/datasheet/axt530124.aspx?p=10552986&src-supplier=Onlinecomponents.com; Supplier Part Number 1: 255-2410-1-ND; LCSC Part Number: C2924271
footprint AXT530124_
pins: 1, 2, 3, 4, 5, 6, 7, 8, 9, 10, 11, 12, 13, 14, 15, 16, 17, 18, 19, 20, 21, 22, 23, 24, 25, 26, 27, 28, 29, 30, MP1, MP2, MP3, MP4

## BM20B(0.8)-24DS-0.4V(51)
designator J?
CONN RCPT 24POS SMD GOLD; Manufacturer: Hirose Electric Co Ltd; Manufacturer Part Number: BM20B(0.8)-24DS-0.4V(51); Item Type: Connectors (Board to Board); Package: Custom; LCSC Part Number: C424537; ComponentLink1Description: LCSC; Supplier: Digi-Key; Supplier Part Number: 26-BM20B(0.8)-24DS-0.4V(51)CT-ND; RoHS: Yes; Category: Connectors; Stock: 5402; Pricing: 1=1.32, 10=1.114, 25=1.068, 50=1.0454, 100=0.9999, 250=0.909, 500=0.8181, 1000=0.7272, 2500=0.65902 (USD); ComponentLink2URL: https://datasheet.ciiva.com/24244/en-bm20-20130409-270407-24244272.pdf?src-supplier=Mouser; ComponentLink2Description: https://datasheet.ciiva.com/24244/en-bm20-20130409-270407-24244272.pdf?src-supplier=Mouser
footprint BM20B(0.8)-24DS-0.4V(51)
pins: 1, 2, 3, 4, 5, 6, 7, 8, 9, 10, 11, 12, 13, 14, 15, 16, 17, 18, 19, 20, 21, 22, 23, 24

## BM23FR0.6-40DP-0.35V(51)
designator J?
CONN HDR 40POS SMD GOLD; Manufacturer: Hirose Electric Co Ltd; Manufacturer Part Number: BM23FR0.6-40DP-0.35V(51); Item Type: Connector; Package: Custom
footprint BM23FR0.6-40DP-0.35V(51)
pins: 1, 2, 3, 4, 5, 6, 7, 8, 9, 10, 11, 12, 13, 14, 15, 16, 17, 18, 19, 20, 21, 22, 23, 24, 25, 26, 27, 28, 29, 30, 31, 32, 33, 34, 35, 36, 37, 38, 39, 40, S1, S2, S3, S4

## BM23FR0.6-40DS-0.35V(895)
designator J?
40 Position Straight Type Receptacle Signal Only Board to FPC Connector; Manufacturer: Hirose; Manufacturer Part Number: BM23FR0.6-40DS-0.35V(895); Supplier: Mouser; Supplier Part Number: 798-3FR0640DS035V895; RoHS: Yes; Category: Connectors; Stock: 1106; Pricing: 1=1.5, 10=1.23, 50=1.23, 100=1.06, 1000=0.833, 10000=0.722 (USD); ComponentLink1URL: https://www.hirose.com/product/download/?distributor=digikey&amp;type=specSheet&amp;lang=en&amp;num=BM23FR0.6-40DS-0.35V(895)&src-supplier=Digikey; ComponentLink1Description: https://www.hirose.com/product/download/?distributor=digikey&amp;type=specSheet&amp;lang=en&amp;num=BM23FR0.6-40DS-0.35V(895)&src-supplier=Digikey; Item Type: Connector
footprint BM23FR0.6-40DS-0.35V(895)
pins: 1, 2, 3, 4, 5, 6, 7, 8, 9, 10, 11, 12, 13, 14, 15, 16, 17, 18, 19, 20, 21, 22, 23, 24, 25, 26, 27, 28, 29, 30, 31, 32, 33, 34, 35, 36, 37, 38, 39, 40, S1, S2, S3, S4

## BS-24-A1AJ008
designator J?
Battery base -25℃~+85℃ CR2477 Plugin Battery Connectors ROHS; Manufacturer: MYOUNG; Manufacturer Part Number: BS-24-A1AJ008; Package: Plugin; LCSC Part Number: C964814; Item Type: Battery Connector; ComponentLink1Description: LCSC; ComponentLink1URL: https://www.lcsc.com/product-detail/Pre-ordered-Products_MYOUNG-BS-24-A1AJ008_C964814.html
footprint BS-24-A1AJ008
pins: 1 ++, 2 --

## BS-CR2032-8
designator J?
Battery holder -40℃~+85℃ Gold Copper end CR2032 SMD Button And Strip Battery Connector ROHS; Manufacturer: Lian Xin Technology; Manufacturer Part Number: BS-CR2032-8; Item Type: Cell Holder; Package: SMD; LCSC Part Number: C7498149; ComponentLink1Description: LCSC; ComponentLink1URL: https://www.lcsc.com/product-detail/Button-And-Strip-Battery-Connector_Lian-Xin-Technology-BS-CR2032-8_C7498149.html
footprint BS-CR2032-8
pins: 1 --, 2 ++

## BWMMCX-KWE
designator J?
1 Inner bore MCX/MMCX Board Edge Bend 6.8mm 6GHz 50Ω 3.45mm Plugin RF Connectors / Coaxial Connectors ROHS; Manufacturer: BAT WIRELESS; Manufacturer Part Number: BWMMCX-KWE; LCSC Part Number: C5137199; Item Type: Coaxial Connector; ComponentLink1Description: LCSC; ComponentLink1URL: https://www.lcsc.com/product-detail/RF-Connectors-Coaxial-Connectors_BAT-WIRELESS-BWMMCX-KWE_C5137199.html
footprint BWMMCX-KWE
pins: 1 Signal "Signal Pin", 2 GND, 3 GND, 4 GND, 5 GND

## C145958
designator J?
1x6P SH 1 1mm 6 Phosphor coppe SMD,P=1mm Wire To Board / Wire To Wire Connector ROHS; Manufacturer Part Number: C145958; Manufacturer: BOOMELE; Package: SMD,P=1mm; LCSC Part Number: C145958; ComponentLink1Description: LCSC; ComponentLink1URL: https://www.lcsc.com/product-detail/Wire-To-Board-Wire-To-Wire-span-style-background-color-ff0-Connector-span_BOOMELE-Boom-Precision-Elec-C145958_C145958.html; Item Type: Connector
footprint Voltlink Horizontal
pins: 1, 2, 3, 4, 5, 6, MP1, MP2

## C145963
designator J?, comment Voltlink Target
1x6P SH 1 1mm 6 SMD,P=1mm Wire To Board / Wire To Wire Connector ROHS; Manufacturer: BOOMELE; Manufacturer Part Number: C145963; Package: SMD,P=1mm; LCSC Part Number: C145963; Item Type: Connector; ComponentLink1Description: LCSC; ComponentLink1URL: https://www.lcsc.com/product-detail/Wire-To-Board-Wire-To-Wire-Connector_BOOMELE-Boom-Precision-Elec-C145963_C145963.html
footprint Voltlink Target
pins: 1, 2, 3, 4, 5, 6, MP1, MP2

## Clamp-Terminal-A
designator J?
PinHeader_1x05_P5.00mm_Vertical
footprint Clamp-Terminal-A
pins: 1, 2, 3, 4, 5

## Clamp-Terminal-B
designator J?
PinHeader_1x05_P5.00mm_Vertical
footprint Clamp-Terminal-B.
pins: 1, 2, 3, 4, 5

## CON-JACK_JACK-PLUG0
designator J?
DC POWER JACK Power Jack, DC, Right Angle, Through Hole, Rated 5A at 16VDC, PC Terminals; Item Type: DC Jack
footprint CON-JACK_JACK-PLUG0
pins: 1 (power), 3 (power)

## CON-SMA-EDGE-S
designator J?, comment SMA Jack
Sma Female Connector, Pcb Edge Mount Rohs Compliant: Yes; Manufacturer: RF Solutions; Manufacturer Part Number: CON-SMA-EDGE-S; Number of Ports: 1; Supplier 1: Rs; RoHS: Yes; Category: RF / Coaxial Connectors; Stock 1: 4145; Pricing 1: 1=1.16, 10=0.96 (GBP); Mount: Edge,Board; Case/Package: SMA; Connector Type: SMA; Fastening Type: Threaded; Termination: Solder; Series: -; ComponentLink1URL: https://media.digikey.com/pdf/Data%20Sheets/RF%20Solutions%20PDFs/CON-SMA-EDGE.pdf?src-supplier=Digi-Key; ComponentLink1Description: https://media.digikey.com/pdf/Data%20Sheets/RF%20Solutions%20PDFs/CON-SMA-EDGE.pdf?src-supplier=Digi-Key; Package: THT; Item Type: Connector; Supplier Part Number 1: 1258191
footprint CON-SMA-EDGE_S
pins: 1 ANT, 2 GND, 3 GND, 4 GND, 5 GND

## CR2032-BS-6-1
designator J?
Battery base CR2032 SMD Battery Connectors ROHS; Manufacturer Part Number: CR2032-BS-6-1; Manufacturer: Q&J; LCSC Part Number: C70377; Item Type: Connector; ComponentLink1Description: LCSC; ComponentLink1URL: https://www.lcsc.com/product-detail/Battery-Connectors_Q-J-CR2032-BS-6-1_C70377.html
footprint CR2032-BS-6-1
pins: 1 ++, 2 --

## D-DMR009PF-D002
designator J?
9P Female D-Sub Right-Angle 2 3A -50℃~+105℃ Push-Pull D-Sub / VGA connector ROHS; Manufacturer: Ckmtw; Manufacturer Part Number: D-DMR009PF-D002; Package: Push-Pull; LCSC Part Number: C141882; Item Type: VGA connector; ComponentLink1Description: LCSC; ComponentLink1URL: https://www.lcsc.com/product-detail/D-Sub-VGA-connector_Ckmtw-Shenzhen-Cankemeng-D-DMR009PF-D002_C141882.html
footprint D-DMR009PF-D002
pins: 1, 2, 3, 4, 5, 6, 7, 8, 9, 10 MH1, 11 MH2

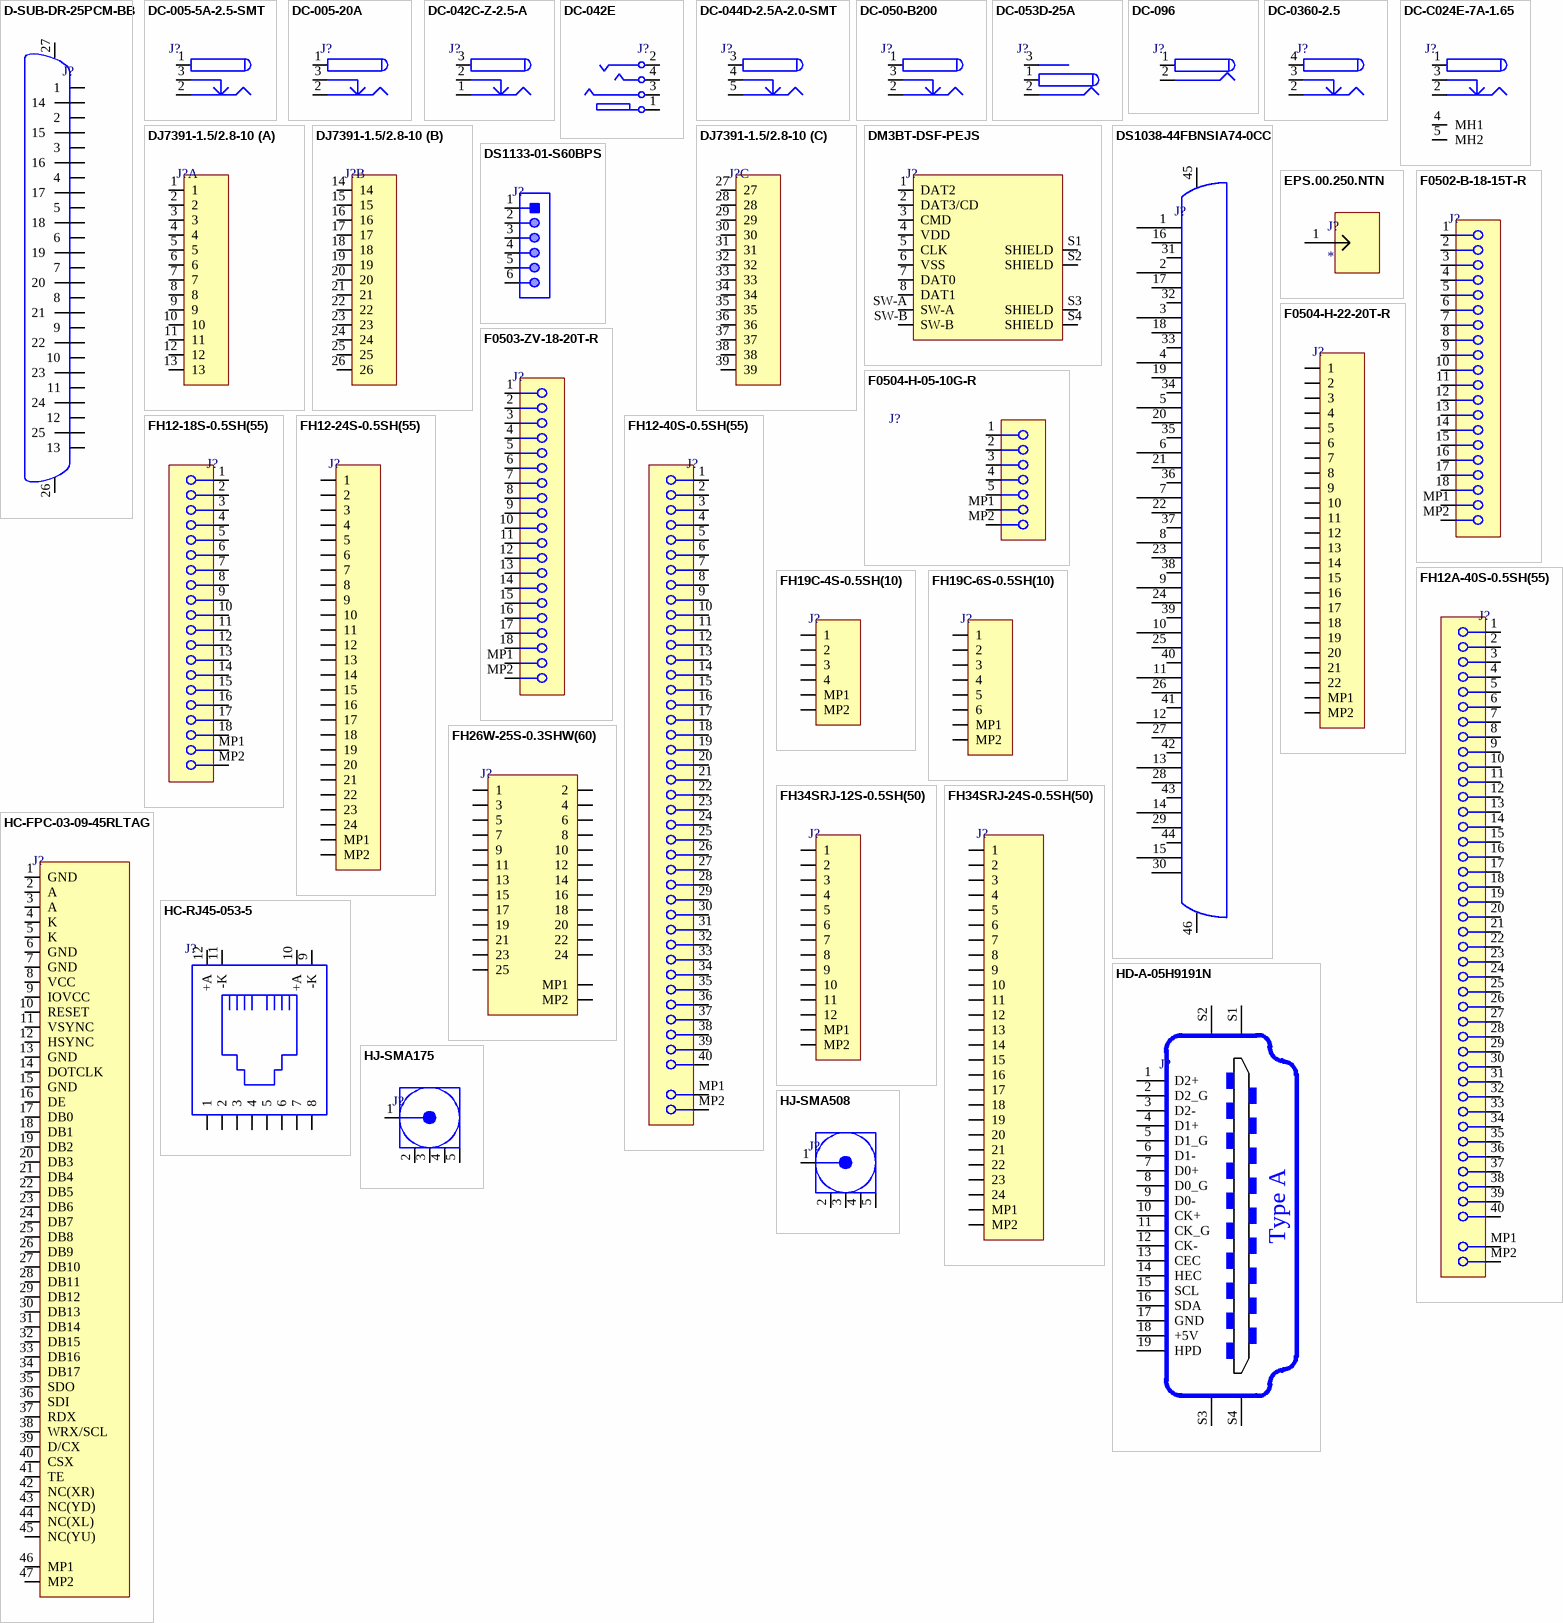
[diagram p4: symbols D-SUB-DR-25PCM-BB to HJ-SMA508]

## D-SUB-DR-25PCM-BB
designator J?
25P Female D-Sub Right-Angle 2 3A -50℃~+105℃ Push-Pull D-Sub / VGA connector ROHS; Manufacturer: XUNPU; Manufacturer Part Number: D-SUB-DR-25PCM-BB; Package: Push-Pull; LCSC Part Number: C19077339; Item Type: D-Sub / VGA connector; ComponentLink1Description: LCSC; ComponentLink1URL: https://www.lcsc.com/product-detail/D-Sub-VGA-connector_XUNPU-D-SUB-DR-25PCM-BB_C19077339.html
footprint D-SUB-DR-25PCM-BB
pins: 1, 2, 3, 4, 5, 6, 7, 8, 9, 10, 11, 12, 13, 14, 15, 16, 17, 18, 19, 20, 21, 22, 23, 24, 25, 26, 27

## DC-005-5A-2.5-SMT
designator J?
DC Power Receptacle Jack 2.5A 2.5mm 6.5mm SMD Power Connectors RoHS; Manufacturer: XKB Enterprise; Manufacturer Part Number: DC-005-5A-2.5-SMT; Value: Custom; Package: Custom; ComponentLink1Description: LCSC; ComponentLink1URL: https://www.lcsc.com/product-detail/AC-DC-Power-Connectors_XKB-Connectivity-DC-005-5A-2-5-SMT_C319133.html; LCSC Part Number: C319133
footprint DC-005-5A-2.5-SMT
pins: 1 (power), 2 (power), 3 (power)

## DC-005-20A
designator J?
2mm 6.4mm 500mA 30V Plugin DC Power Connector ROHS; Manufacturer: Korean Hroparts Elec; Manufacturer Part Number: DC-005-20A; Package: Plugin; LCSC Part Number: C136744; Item Type: DC Power Connector; ComponentLink1Description: LCSC; ComponentLink1URL: https://www.lcsc.com/product-detail/DC-Power-Connector_Korean-Hroparts-Elec-DC-005-20A_C136744.html
footprint DC-005-20A
pins: 1 (power), 2 (power), 3 (power)

## DC-042C-Z-2.5-A
designator J?
Shrouded DC Power Receptacle 260℃ Brass -20℃~+70℃ 2.5mm 6mm 10A 20V Plugin AC/DC Power Connectors ROHS; Manufacturer: XKB INDUSTRIAL PRECISION LIMITED; Manufacturer Part Number: DC-042C-Z-2.5-A; ComponentLink1Description: LCSC; ComponentLink1URL: https://www.lcsc.com/product-detail/AC-span-style-background-color-ff0-DC-span-Power-Connectors_XKB-Connectivity-DC-042C-Z-2-5-A_C706901.html; LCSC Part Number: C706901; Item Type: Connector
footprint DC-042C-Z-2.5-A
pins: 1 (power), 2 (power), 3 (power)

## DC-042E
designator J?
DC Power Receptacle 260℃ Brass -20℃~+70℃ 2mm 7.5mm 10A 36V Plugin AC/DC Power Connectors ROHS; Manufacturer: XKB Connectivity; Manufacturer Part Number: DC-042E; Package: Plugin; LCSC Part Number: C397340; Item Type: Connector; ComponentLink1Description: LCSC; ComponentLink1URL: https://www.lcsc.com/product-detail/AC-span-style-background-color-ff0-DC-span-Power-Connectors_XKB-Connectivity-DC-042E_C397340.html
footprint DC-042E
pins: 1 "Sleeve (Ground)", 2, 3 "Tip/Left Channel/(+)", 4 "Tip/Left Channel/(+)"

## DC-044D-2.5A-2.0-SMT
designator J?
Panel Mounting DC Power Receptacle 260℃ Brass -20℃~+70℃ 2mm 6mm 2.5A 24V SMD AC/DC Power Connectors ROHS; Manufacturer: XKB Connectivity; Manufacturer Part Number: DC-044D-2.5A-2.0-SMT; Item Type: DC Power Jack; Package: SMD; LCSC Part Number: C397342; ComponentLink1Description: LCSC; ComponentLink1URL: https://www.lcsc.com/product-detail/AC-DC-Power-Connectors_XKB-Connectivity-DC-044D-2-5A-2-0-SMT_C397342.html
footprint DC-044D-2.5A-2.0-SMT
pins: 3 (power), 4 (power), 5 (power)

## DC-050-B200
designator J?
Surface Mount DC Power Receptacle -20℃~+70℃ 2mm 6.4mm 2A 30V SMD AC/DC Power Connectors ROHS; Manufacturer: XUNPU; Manufacturer Part Number: DC-050-B200; Item Type: DC Jack; Package: Custom; LCSC Part Number: C720582; ComponentLink1Description: LCSC; ComponentLink1URL: https://www.lcsc.com/product-detail/AC-DC-Power-Connectors_XUNPU-DC-050-B200_C720582.html
footprint DC-050-B200
pins: 1 (power), 2 (power), 3 (power)

## DC-053D-25A
designator J?
Shrouded DC Power Receptacle -20℃~+70℃ 2.5mm 6.5mm 10A 16V Plugin AC/DC Power Connectors ROHS; Manufacturer: Korean Hroparts Elec; Manufacturer Part Number: DC-053D-25A; Item Type: DC JACK; Package: Custom; LCSC Part Number: C2686352; ComponentLink1Description: LCSC; ComponentLink1URL: https://www.lcsc.com/product-detail/AC-DC-Power-Connectors_Korean-Hroparts-Elec-DC-053D-25A_C2686352.html
footprint DC-053D-25A
pins: 1 (power), 2 (power), 3 (power)

## DC-096
designator J?
DC Power Jack Socket Female Panel Mount Connector; Manufacturer: CW Switch Elec. Store; Manufacturer Part Number: DC-096; Item Type: DC Jack Female
footprint DC-096
pins: 1 (power), 2 (power)

## DC-0360-2.5
designator J?
DC Power Receptacle 260℃ Brass -20℃~+70℃ 2.5mm 6mm 2.5A 24V Plugin AC/DC Power Connectors ROHS; Manufacturer: XKB Connectivity; Manufacturer Part Number: DC-0360-2.5; Item Type: DC Jack; Package: Plugin; LCSC Part Number: C319122; ComponentLink1Description: LCSC; ComponentLink1URL: https://www.lcsc.com/product-detail/AC-DC-Power-Connectors_XKB-Connectivity-DC-0360-2-5_C319122.html
footprint DC-0360-2.5
pins: 2 (power), 3 (power), 4 (power)

## DC-C024E-7A-1.65
designator J?
DC Power Receptacle 1.65mm 4.3mm 7A 24V Plugin AC/DC Power Connectors ROHS; Maunfacturer Part Number: DC-C024E-7A-1.65; Manufacturer: XKB Connectivity; Footprint: Custom; ComponentLink1Description: LCSC; ComponentLink1URL: https://lcsc.com/product-detail/AC-span-style-background-color-ff0-DC-span-Power-Connectors_XKB-Connectivity-DC-C024E-7A-1-65_C397335.html; LCSC Part Number: C397335
footprint DC-C024E-7A-1.65_
pins: 1 (power), 2 (power), 3 (power), 4 MH1 (power), 5 MH2 (power)

## DJ7391-1.5/2.8-10
designator J?
footprint DJ7391-1.5/2.8-10
part A pins: 1, 2, 3, 4, 5, 6, 7, 8, 9, 10, 11, 12, 13
part B pins: 14, 15, 16, 17, 18, 19, 20, 21, 22, 23, 24, 25, 26
part C pins: 27, 28, 29, 30, 31, 32, 33, 34, 35, 36, 37, 38, 39

## DM3BT-DSF-PEJS
designator J?
CONN MICRO SD CARD PUSH-PUSH R/A; Manufacturer: Hirose; Manufacturer Part Number: DM3BT-DSF-PEJS; Max Current Rating: 500mA; Contact Resistance: 100mR; Voltage Rating (AC): 125V; Gender: Female; Number of Contacts: 8; Connector Type: Connector,Socket; Insulation Resistance: 1GR; Pitch: 1.1mm; Item Type: SD Card Connector; Supplier 1: Future Electronics; RoHS: Yes; Category: Memory Connectors; Stock 1: 9600; Pricing 1: 1200=1.39000 (USD); Mount: Surface Mount,Reverse; Contact Material: Copper Alloy,Copper; Contact Plating: Gold; Housing Material: Polymer; Min Operating Temperature: -25°C; Max Operating Temperature: 85°C; Number of Rows: 1; Packaging: Tape and Reel; Current Rating: 500mA; Package Quantity: 1; Termination: Solder; Max Voltage Rating (AC): 125V; Number of Positions: 8; Orientation: Right Angle; Series: DM3; Length: 13.85mm; Width: 16.05mm; Depth: 1.83mm; Radiation Hardening: No; Reach SVHC Compliant: Yes; Lead Free: Lead Free; Flammability Rating: UL94 V-0; RoHS Compliant: Yes; ComponentLink1URL: https://datasheet.ciiva.com/683/doc-1806131255093-683387.pdf?src-supplier=Digi-Key; ComponentLink1Description: https://datasheet.ciiva.com/683/doc-1806131255093-683387.pdf?src-supplier=Digi-Key; Supplier Part Number 1: 3000978; LCSC Part Number: C597972
footprint DM3BT-DSF-PEJS
pins: 1 DAT2, 2 DAT3/CD, 3 CMD, 4 VDD, 5 CLK, 6 VSS, 7 DAT0, 8 DAT1, S1 SHIELD, S2 SHIELD, S3 SHIELD, S4 SHIELD, SW-A, SW-B

## DS1038-44FBNSIA74-0CC
designator J?
44P Female D-Sub Right-Angle 3 1.5A -40℃~+105℃ Push-Pull D-Sub / VGA connector ROHS; Manufacturer: CONNFLY Elec; Manufacturer Part Number: DS1038-44FBNSIA74-0CC; Package: Push-Pull; LCSC Part Number: C77844; Item Type: D-Sub / VGA connector; ComponentLink1Description: LCSC; ComponentLink1URL: https://www.lcsc.com/product-detail/D-Sub-VGA-connector_CONNFLY-Elec-DS1038-44FBNSIA74-0CC_C77844.html
footprint DS1038-44FBNSIA74-0CC
pins: 1, 2, 3, 4, 5, 6, 7, 8, 9, 10, 11, 12, 13, 14, 15, 16, 17, 18, 19, 20, 21, 22, 23, 24, 25, 26, 27, 28, 29, 30, 31, 32, 33, 34, 35, 36, 37, 38, 39, 40, 41, 42, 43, 44, 45, 46

## DS1133-01-S60BPS
designator J?
RJ11 RJReceptacle No 1 Plugin Ethernet Connectors/Modular Connectors (RJ45 RJ11) ROHS; Manufacturer: CONNFLY Elec; Manufacturer Part Number: DS1133-01-S60BPS; Item Type: RJ11 Ethernet Connector; Package: Custom; LCSC Part Number: C77854; ComponentLink1Description: LCSC; ComponentLink1URL: https://www.lcsc.com/product-detail/Ethernet-Connectors-Modular-Connectors-RJ45-RJ11_CONNFLY-Elec-DS1133-01-S60BPS_C77854.html
footprint DS1133-01-S60BPS
pins: 1, 2, 3, 4, 5, 6

## EPS.00.250.NTN
designator J?
Conn Circular F 1 POS Solder RA Thru-Hole 1 Terminal 1 Port; Manufacturer: LEMO; Manufacturer Part Number: EPS.00.250.NTN; Supplier: Digi-Key; Supplier Part Number: 1124-1357-ND; RoHS: Yes; Category: RF / Coaxial Connectors; Stock: 1561; Pricing: 1=21.34, 10=18.685, 25=17.878, 50=17.3012, 100=16.7246, 250=15.80184, 500=15.34048 (USD); ComponentLink1URL: https://datasheet.ciiva.com/7007/eps-00-250-ntn-web-7007077.pdf?src-supplier=Digi-Key; ComponentLink1Description: https://datasheet.ciiva.com/7007/eps-00-250-ntn-web-7007077.pdf?src-supplier=Digi-Key; ComponentLink2URL: https://datasheet.ciiva.com/5089/lemo-connector-selector-5089951.pdf?src-supplier=Mouser; ComponentLink2Description: https://datasheet.ciiva.com/5089/lemo-connector-selector-5089951.pdf?src-supplier=Mouser
footprint EPS.00.250.NTN
pins: 1

## F0502-B-18-15T-R
designator J?
Clamshell -25℃~+85℃ 18P Bottom Contact Surface Mount 0.5mm SMD,P=0.5mm FFC/FPC Connectors ROHS; Manufacturer: XFCN; Manufacturer Part Number: F0502-B-18-15T-R; Package: SMD,P=0.5mm; LCSC Part Number: C2889974; Item Type: FPC Connector; ComponentLink1Description: LCSC; ComponentLink1URL: https://www.lcsc.com/product-detail/FFC-FPC-Connectors_XFCN-F0502-B-18-15T-R_C2889974.html
footprint F0502-B-18-15T-R
pins: 1, 2, 3, 4, 5, 6, 7, 8, 9, 10, 11, 12, 13, 14, 15, 16, 17, 18, MP1, MP2

## F0503-ZV-18-20T-R
designator J?
Slide Lock 18P Contact, Vertical - One Side Brick nogging 0.5mm SMD,P=0.5mm FFC/FPC Connectors ROHS; Manufacturer: XFCN; Manufacturer Part Number: F0503-ZV-18-20T-R; Package: SMD,P=0.5mm; LCSC Part Number: C481243; Item Type: FPC Connector; ComponentLink1Description: LCSC; ComponentLink1URL: https://www.lcsc.com/product-detail/FFC-FPC-Connectors_XFCN-F0503-ZV-18-20T-R_C481243.html
footprint F0503-ZV-18-20T-R
pins: 1, 2, 3, 4, 5, 6, 7, 8, 9, 10, 11, 12, 13, 14, 15, 16, 17, 18, MP1, MP2

## F0504-H-05-10G-R
designator J?
Clamshell -25℃~+85℃ 5 Double-sided contacts/up and down connection Surface Mount 0.5mm SMD,P=0.5mm FFC/FPC Connectors ROHS; Manufacturer: XFCN; Manufacturer Part Number: F0504-H-05-10G-R; Package: SMD,P=0.5mm; LCSC Part Number: C2889992; Item Type: FPC Connector; ComponentLink1Description: LCSC; ComponentLink1URL: https://www.lcsc.com/product-detail/FFC-FPC-Connectors_XFCN-F0504-H-05-10G-R_C2889992.html
footprint F0504-H-05-10G-R
pins: 1, 2, 3, 4, 5, MP1, MP2

## F0504-H-22-20T-R
designator J?
Clamshell 22 Double-sided contacts/up and down connection Surface Mount 0.5mm SMD,P=0.5mm FFC/FPC Connectors ROHS; Manufacturer: XFCN; Manufacturer Part Number: F0504-H-22-20T-R; Item Type: Clamshell Connector; Footprint: Custom; ComponentLink1Description: LCSC; ComponentLink1URL: https://lcsc.com/product-detail/FFC-FPC-Connectors_XFCN-F0504-H-22-20T-R_C557729.html; LCSC Part Number: C557729
footprint F0504-H-22-20T-R_
pins: 1, 2, 3, 4, 5, 6, 7, 8, 9, 10, 11, 12, 13, 14, 15, 16, 17, 18, 19, 20, 21, 22, MP1, MP2

## FH12-18S-0.5SH(55)
designator J?
CONN FFC BOTTOM 18POS 0.5MM R/A; Manufacturer: Hirose; Manufacturer Part Number: FH12-18S-0.5SH(55); Item Type: FPC Connector; Supplier: Future Electronics; Supplier Part Number: 3036611; RoHS: Yes; Category: FFC / FPC; Stock: 2000; Pricing: 2000=1.08 (USD); ComponentLink1URL: https://datasheet.ciiva.com/15176/getdatasheetpartid-437464-15176850.pdf?src-supplier=Verical; ComponentLink1Description: https://datasheet.ciiva.com/15176/getdatasheetpartid-437464-15176850.pdf?src-supplier=Verical; ComponentLink2URL: https://datasheet.ciiva.com/22630/58803-22630341.pdf?src-supplier=Farnell; ComponentLink2Description: https://datasheet.ciiva.com/22630/58803-22630341.pdf?src-supplier=Farnell; LCSC Part Number: C506792
footprint FH12-18S-0.5SH(55)
pins: 1, 2, 3, 4, 5, 6, 7, 8, 9, 10, 11, 12, 13, 14, 15, 16, 17, 18, MP1, MP2

## FH12-24S-0.5SH(55)
designator J?
CONN FFC BOTTOM 24POS 0.50MM R/A; Manufacturer: Hirose; Manufacturer Part Number: FH12-24S-0.5SH(55); Item Type: FFC Connector; Supplier 1: RSComponents; RoHS: Yes; Category: FFC / FPC; Stock 1: 30; Pricing 1: 5=0.91700, 100=0.76200, 375=0.63900, 1500=0.59600, 3000=0.55300 (USD); ComponentLink1URL: https://datasheet.ciiva.com/15176/getdatasheetpartid-439675-15176853.pdf?src-supplier=Verical; ComponentLink1Description: https://datasheet.ciiva.com/15176/getdatasheetpartid-439675-15176853.pdf?src-supplier=Verical; ComponentLink2URL: https://datasheet.ciiva.com/22630/58803-22630351.pdf?src-supplier=Farnell; ComponentLink2Description: https://datasheet.ciiva.com/22630/58803-22630351.pdf?src-supplier=Farnell; ComponentLink3URL: https://datasheet.ciiva.com/5137/ed-fh12-20140305-355586-5137161.pdf?src-supplier=Mouser; ComponentLink3Description: https://datasheet.ciiva.com/5137/ed-fh12-20140305-355586-5137161.pdf?src-supplier=Mouser; ComponentLink4URL: https://datasheet.ciiva.com/22697/58803-22697094.pdf?src-supplier=Element14; ComponentLink4Description: https://datasheet.ciiva.com/22697/58803-22697094.pdf?src-supplier=Element14; ComponentLink5URL: https://datasheet.ciiva.com/7661/58803-7661382.pdf?src-supplier=Element14; ComponentLink5Description: https://datasheet.ciiva.com/7661/58803-7661382.pdf?src-supplier=Element14; Supplier Part Number 1: 7388827; LCSC Part Number: C202112
footprint FH12-24S-0.5SH(55)_
pins: 1, 2, 3, 4, 5, 6, 7, 8, 9, 10, 11, 12, 13, 14, 15, 16, 17, 18, 19, 20, 21, 22, 23, 24, MP1, MP2

## FH12-40S-0.5SH(55)
designator J?
CONN FFC BOTTOM 40POS 0.50MM R/A; Manufacturer: Hirose; Manufacturer Part Number: FH12-40S-0.5SH(55); Connector Type: CARD EDGE CONNECTOR; Option: General Purpose; Filter Feature: No; Number of Rows Loaded: 1; Number of Contacts: 40; Contact Pattern: RECTANGULAR; Contact Resistance: 50mR; Contact Style: BELLOWED TYPE; Dielectric Withstanding Voltage (AC): 150V; Durability: 20Cycles; Insulation Resistance: 500MR; Rated Current (Signal): 400mA; Body Breadth: 0.079inch; Body Depth: 0.22inch; Body Length: 0.949inch; Mating Contact Pitch: 0.02inch; Mounting Option 1: EJECT LEVER; Mounting Option 2: LOCKING; Reference Standard: UL; Reliability: COMMERCIAL; Item Type: Connector; Supplier 1: Digi-Key; RoHS: Yes; Category: FFC / FPC; Stock 1: 11247; Pricing 1: 1=3.00000, 10=2.72800, 25=2.58400, 50=2.52400, 100=2.40380, 250=2.10332, 500=2.04324, 1000=1.74276 (USD); Mounting Technology: Board; Contact Finish - Mating: NOT SPECIFIED; Contact Finish - Termination: Nickel/Gold (Ni/Au); Insulation Color: Beige; Insulation Material: Polyamide; Min Operating Temperature: -40°C; Max Operating Temperature: 70°C; JESD-609 Code: e4; Contact Gender: Female; Mixed Contacts: No; Mounting Style: RIGHT ANGLE; Termination: SMD/SMT; Number Of PCB Rows: 1; PCB Contact Pattern: RECTANGULAR; Terminal Pitch: 0.5mm; Flammability Rating: UL94 V-0; RoHS Compliant: Yes; DIN Conformance: No; IEC Conformance: No; MIL Conformance: No; Reach SVHC Compliant: Yes; ComponentLink1URL: https://datasheet.ciiva.com:443/pdfs/VipMasterIC/IC/HIRO/HIRO-S-A0003089604/HIRO-S-A0008599618-1.pdf?src-supplier=IHS+Markit; ComponentLink1Description: https://datasheet.ciiva.com:443/pdfs/VipMasterIC/IC/HIRO/HIRO-S-A0003089604/HIRO-S-A0008599618-1.pdf?src-supplier=IHS+Markit; ComponentLink2URL: https://datasheet.ciiva.com/11745/0900766b80d985fc-11745617.pdf?src-supplier=RSComponents; ComponentLink2Description: https://datasheet.ciiva.com/11745/0900766b80d985fc-11745617.pdf?src-supplier=RSComponents; ComponentLink3URL: https://datasheet.ciiva.com/15176/getdatasheetpartid-432539-15176843.pdf?src-supplier=Verical; ComponentLink3Description: https://datasheet.ciiva.com/15176/getdatasheetpartid-432539-15176843.pdf?src-supplier=Verical; ComponentLink4URL: https://datasheet.ciiva.com/7661/58803-7661389.pdf?src-supplier=Element14; ComponentLink4Description: https://datasheet.ciiva.com/7661/58803-7661389.pdf?src-supplier=Element14; Supplier Part Number 1: 26-FH12-40S-0.5SH(55)CT-ND; LCSC Part Number: C202114
footprint FH12-40S-0.5SH(55)
pins: 1, 2, 3, 4, 5, 6, 7, 8, 9, 10, 11, 12, 13, 14, 15, 16, 17, 18, 19, 20, 21, 22, 23, 24, 25, 26, 27, 28, 29, 30, 31, 32, 33, 34, 35, 36, 37, 38, 39, 40, MP1, MP2